# Altium schematic symbol library ECG_PCB.SchLib: 40 symbols
Pins are listed as number, name and electrical type; pins without a type are passive.

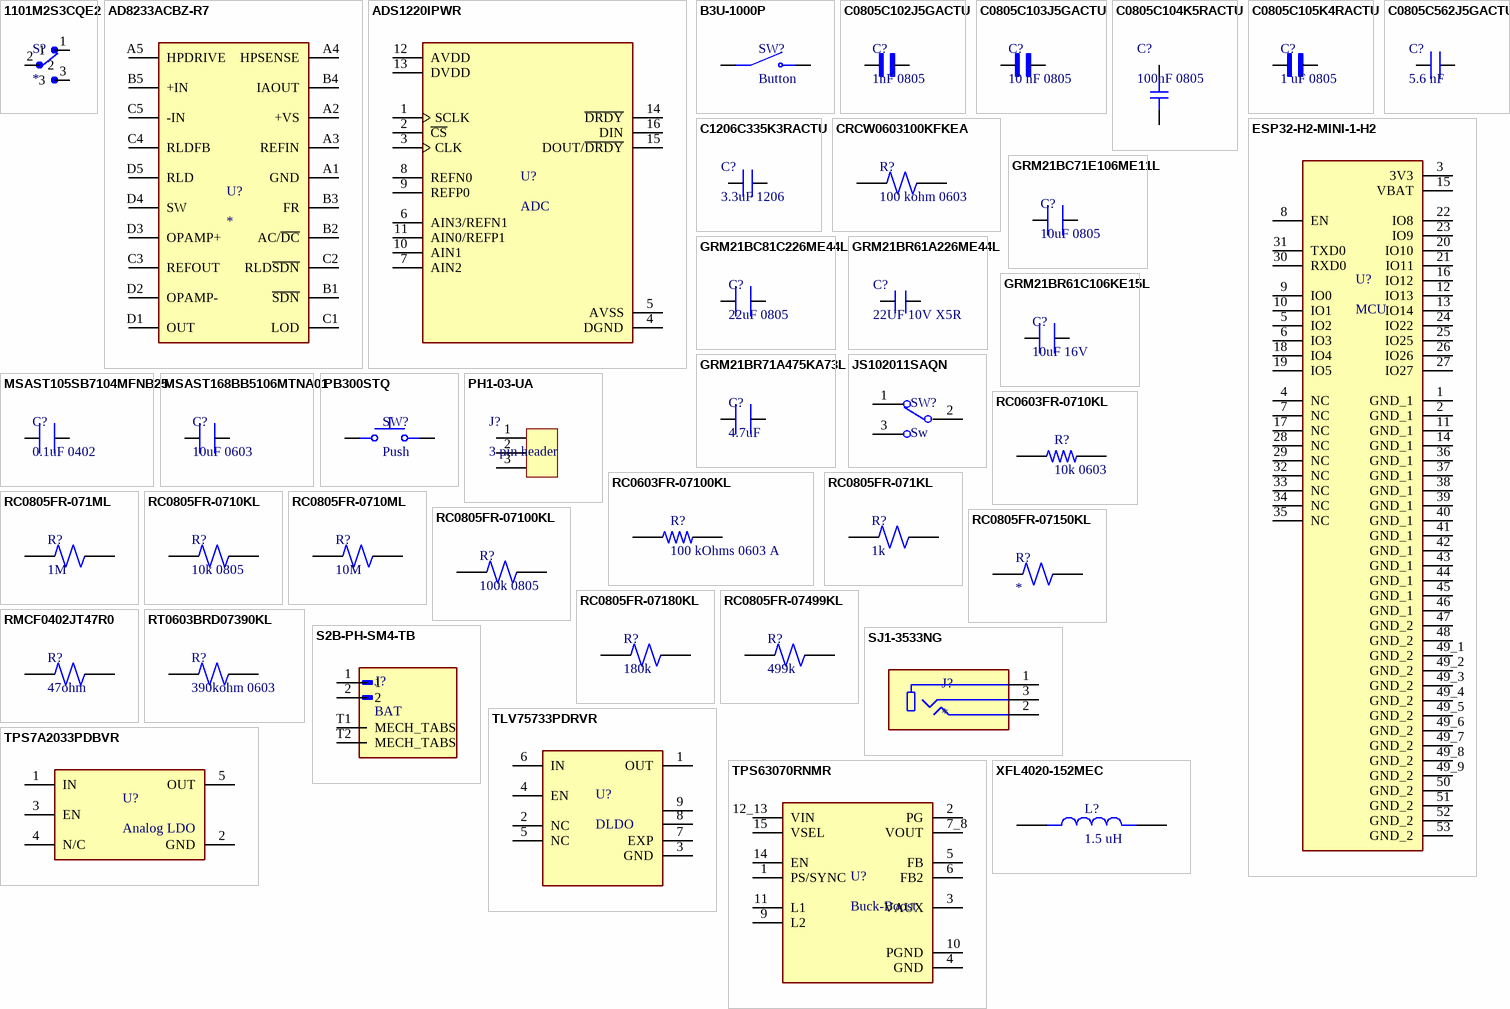
[diagram p0: symbols 1101M2S3CQE2 to XFL4020-152MEC]

## 1101M2S3CQE2
designator S?
Switch,Slide,Sealed,SPDT,ON-NONE-ON,PC Mnt,.200 Blk Act,6A,120VAC,PC Thru-Hole | C&K 1101M2S3CQE2; SnapEDA_Link: https://www.snapeda.com/parts/1101M2S3CQE2/C%2526K/view-part/?ref=snap; Package: None; Value: *; MF: C&K; MP: 1101M2S3CQE2; Check_prices: https://www.snapeda.com/parts/1101M2S3CQE2/C%2526K/view-part/?ref=eda
footprint SW_1101M2S3CQE2
pins: 1, 2, 3

## AD8233ACBZ-R7
designator U?
50 Î¼A, 2 mm Ã— 1.7 mm WLCSP, Low Noise, Heart Rate Monitor for Wearable Products; MF: Analog Devices; MP: AD8233ACBZ-R7; SnapEDA_Link: https://www.snapeda.com/parts/AD8233ACBZ-R7/Analog+Devices/view-part/?ref=snap; Package: WLCSP -20 Analog Devices; Value: *; Check_prices: https://www.snapeda.com/parts/AD8233ACBZ-R7/Analog+Devices/view-part/?ref=eda
footprint BGA20N40P5X4_204X170X56N
pins: A1 GND (power), A2 +VS (power), A3 REFIN, A4 HPSENSE, A5 HPDRIVE, B1 ~{SDN}, B2 AC/~{DC}, B3 FR, B4 IAOUT, B5 +IN, C1 LOD, C2 RLD~{SDN}, C3 REFOUT, C4 RLDFB, C5 -IN, D1 OUT, D2 OPAMP-, D3 OPAMP+, D4 SW, D5 RLD

## ADS1220IPWR
designator U?, comment ADC
24-bit, 2-kSPS, four-channel, low-power, delta-sigma ADC with PGA, VREF, SPI and two IDACs; MF: Texas Instruments; MP: ADS1220IPWR; SnapEDA_Link: https://www.snapeda.com/parts/ADS1220IPWR/Texas+Instruments/view-part/?ref=snap; Package: TSSOP-16 Texas Instruments; Value: *; Check_prices: https://www.snapeda.com/parts/ADS1220IPWR/Texas+Instruments/view-part/?ref=eda
footprint SOP65P640X120-16N
pins: 1 SCLK, 2 ~{CS}, 3 CLK, 4 DGND (power), 5 AVSS (power), 6 AIN3/REFN1, 7 AIN2, 8 REFN0, 9 REFP0, 10 AIN1, 11 AIN0/REFP1, 12 AVDD (power), 13 DVDD (power), 14 ~{DRDY}, 15 DOUT/~{DRDY}, 16 DIN

## B3U-1000P
designator SW?, comment Button
Switch Tactile N.O. SPST Round Button Gull Wing 0.05A 12VDC 1.5N SMD Embossed T/R; MP: B3U-1000P; Price: None; Availability: Unavailable; Value: *; Package: None
footprint SW_B3U-1000P
footprint SW_B3U-1000P
pins: 1, 2

## C0805C102J5GACTU
designator C?, comment 1nF 0805
CAP, 1000PF, 50V, 5%, C0G/NP0, 0805; Capacitance:1000pF; Voltage Rating:50V; Ceramic Capacitor Case:0805 [2012 Metric]; Capacitance Tolerance:Â± 5%; Dielectric Characteristic:C0G / NP0; Product Range:C Series KEMET; Opera; MP: C0805C102J5GAC-TU; SnapEDA_Link: https://www.snapeda.com/parts/C0805C102J5GAC-TU/Kemet/view-part/?ref=snap; Package: Package; Value: *; MF: KEMET; Check_prices: https://www.snapeda.com/parts/C0805C102J5GAC-TU/Kemet/view-part/?ref=eda
footprint CAPC2012X88N
pins: 1, 2

## C0805C103J5GACTU
designator C?, comment 10 nF 0805
0805 C 10nF Ceramic Multilayer Capacitor, 50 V, +125degC, C0G Dielectric, +/-5% | KEMET C0805C103J5GACTU; SnapEDA_Link: https://www.snapeda.com/parts/C0805C103J5GACTU/KEMET/view-part/?ref=snap; Package: 0805 Kemet; Value: *; MF: KEMET; MP: C0805C103J5GACTU; Check_prices: https://www.snapeda.com/parts/C0805C103J5GACTU/KEMET/view-part/?ref=eda
footprint CAPC2012X140N
pins: 1, 2

## C0805C104K5RACTU
designator C?, comment 100nF 0805
Capacitor, Ceramic, Cap, .100uF, Tol 10%, SMT, 50V, X7R, Tape/Reel | KEMET C0805C104K5RACTU; SnapEDA_Link: https://www.snapeda.com/parts/C0805C104K5RACTU/KEMET/view-part/?ref=snap; Package: Package; Value: *; MF: KEMET; MP: C0805C104K5RACTU; Check_prices: https://www.snapeda.com/parts/C0805C104K5RACTU/KEMET/view-part/?ref=eda
footprint CAPC2012X88N
pins: 1 A, 2 B

## C0805C105K4RACTU
designator C?, comment 1 uF 0805
Capacitor,Ceramic,Cap 1 uF,Tol 10%,Vol-Rtg 16 VDC,SMT,0805,X7R,Tape & Reel | KEMET C0805C105K4RACTU; SnapEDA_Link: https://www.snapeda.com/parts/C0805C105K4RACTU/KEMET/view-part/?ref=snap; Package: 805-2 KEMET; Value: *; MF: KEMET; MP: C0805C105K4RACTU; Check_prices: https://www.snapeda.com/parts/C0805C105K4RACTU/KEMET/view-part/?ref=eda
footprint CAPC2012X88N
pins: 1, 2

## C0805C562J5GACTU
designator C?, comment 5.6 nF
SMD Comm C0G, Ceramic, 5600 pF, 5%, 50 VDC, C0G, SMD, MLCC, Ultra-Stable, Low Loss, Class I, 0805; Manufacturer_Name: Kemet; Manufacturer_Part_Number: C0805C562J5GACTU; Copyright: Copyright (C) 2025 Ultra Librarian. All rights reserved.
footprint CAPC220145_88N_KEM
pins: 1, 2

## C1206C335K3RACTU
designator C?, comment 3.3uF 1206
SMD Comm X7R, Ceramic, 3.3 uF, 10%, 25 VDC, X7R, SMD, MLCC, Temperature Stable, Class II, 1206; Manufacturer_Name: Kemet; Manufacturer_Part_Number: C1206C335K3RACTU; Copyright: Copyright (C) 2026 Ultra Librarian. All rights reserved.; Datasheet: https://content.kemet.com/datasheets/KEM_C1002_X7R_SMD.pdf
footprint CAPC340180_180N_KEM
pins: 1, 2

## CRCW0603100KFKEA
designator R?, comment 100 kohm 0603
Resistor, Thick Film, 100 Kilohms, 0.1W, 1%, SMT, TCR 37 ppm/DegC, Tape and Reel | Vishay Dale CRCW0603100KFKEA; SnapEDA_Link: https://www.snapeda.com/parts/CRCW0603100KFKEA/Vishay+Dale/view-part/?ref=snap; Package: 1508 Vishay; Value: *; MF: Vishay; MP: CRCW0603100KFKEA; Check_prices: https://www.snapeda.com/parts/CRCW0603100KFKEA/Vishay+Dale/view-part/?ref=eda
footprint RESC1508X50N
pins: 1, 2

## ESP32-H2-MINI-1-H2
designator U?, comment MCU
802.15.4, Bluetooth Bluetooth v5.3, ZigbeeÂ® Transceiver Module 2.4GHz Integrated, Trace Surface Mount; MF: Espressif Systems; MP: ESP32-H2-MINI-1-H2; SnapEDA_Link: https://www.snapeda.com/parts/ESP32-H2-MINI-1-H2/Espressif+Systems/view-part/?ref=snap; Package: SMD-53 Espressif Systems; Value: *; Check_prices: https://www.snapeda.com/parts/ESP32-H2-MINI-1-H2/Espressif+Systems/view-part/?ref=eda
footprint MODULE_ESP32-H2-MINI-1-H2
pins: 1 GND_1 (power), 2 GND_1 (power), 3 3V3 (power), 4 NC, 5 IO2, 6 IO3, 7 NC, 8 EN, 9 IO0, 10 IO1, 11 GND_1 (power), 12 IO13, 13 IO14, 14 GND_1 (power), 15 VBAT (power), 16 IO12, 17 NC, 18 IO4, 19 IO5, 20 IO10, 21 IO11, 22 IO8, 23 IO9, 24 IO22, 25 IO25, 26 IO26, 27 IO27, 28 NC, 29 NC, 30 RXD0, 31 TXD0, 32 NC, 33 NC, 34 NC, 35 NC, 36 GND_1 (power), 37 GND_1 (power), 38 GND_1 (power), 39 GND_1 (power), 40 GND_1 (power), 41 GND_1 (power), 42 GND_1 (power), 43 GND_1 (power), 44 GND_1 (power), 45 GND_1 (power), 46 GND_1 (power), 47 GND_2 (power), 48 GND_2 (power), 49_1 GND_2 (power), 49_2 GND_2 (power), 49_3 GND_2 (power), 49_4 GND_2 (power), 49_5 GND_2 (power), 49_6 GND_2 (power), 49_7 GND_2 (power), 49_8 GND_2 (power), 49_9 GND_2 (power), 50 GND_2 (power), 51 GND_2 (power), 52 GND_2 (power), 53 GND_2 (power)

## GRM21BC71E106ME11L
designator C?, comment 10uF 0805
0805 10 uF 25 V Â±20% Tolerance X7S Multilayer Ceramic Capacitor; MF: Murata; MP: GRM21BC71E106ME11L; SnapEDA_Link: https://www.snapeda.com/parts/GRM21BC71E106ME11L/Murata/view-part/?ref=snap; Package: 2012 Murata; Value: *; Check_prices: https://www.snapeda.com/parts/GRM21BC71E106ME11L/Murata/view-part/?ref=eda
footprint CAPC2012X145N
pins: 1, 2

## GRM21BC81C226ME44L
designator C?, comment 22uF 0805
0805 22 uF 16 V Â±20% Tolerance X6S Multilayer Ceramic Chip Capacitor; MF: Murata Electronics; MP: GRM21BC81C226ME44L; SnapEDA_Link: https://www.snapeda.com/parts/GRM21BC81C226ME44L/Murata+Electronics+North+America/view-part/?ref=snap; Package: 2012 Murata; Value: *; Check_prices: https://www.snapeda.com/parts/GRM21BC81C226ME44L/Murata+Electronics+North+America/view-part/?ref=eda
footprint CAPC2012X145N
pins: 1, 2

## GRM21BR61A226ME44L
designator C?, comment 22UF 10V X5R
CAP CER 22UF 10V X5R 0805; Manufacturer_Name: Murata; Manufacturer_Part_Number: GRM21BR61A226ME44L; Type: Ceramic Capacitors; Copyright: Copyright (C) 2026 Ultra Librarian. All rights reserved.
footprint CAP_GRM21B_MUR
pins: 1, 2

## GRM21BR61C106KE15L
designator C?, comment 10uF 16V
10 ÂµF Â±10% 16V Ceramic Capacitor X5R 0805 (2012 Metric); MF: Murata; MP: GRM21BR61C106KE15L; SnapEDA_Link: https://www.snapeda.com/parts/GRM21BR61C106KE15L/Murata/view-part/?ref=snap; Package: 805-2 Murata; Value: *; Check_prices: https://www.snapeda.com/parts/GRM21BR61C106KE15L/Murata/view-part/?ref=eda
footprint CAPC2012X135N
pins: 1, 2

## GRM21BR71A475KA73L
designator C?, comment 4.7uF
SMD Capacitor X7R(EIA) with Capacitance: 4.7uF Tol. 10%. Rated Voltage: 10Vdc; MF: Murata; MP: GRM21BR71A475KA73L; SnapEDA_Link: https://www.snapeda.com/parts/GRM21BR71A475KA73L/Murata/view-part/?ref=snap; Package: 2012 Murata; Value: *; Check_prices: https://www.snapeda.com/parts/GRM21BR71A475KA73L/Murata/view-part/?ref=eda
footprint CAPC2012X135N
pins: 1, 2

## JS102011SAQN
designator SW?, comment Sw
Slide Switch SPDT Surface Mount, Right Angle; MP: JS102011SAQN; MF: C&K; Check_prices: https://www.snapeda.com/parts/JS102011SAQN/C%2526K/view-part/?ref=eda; Digi-Key_Part_Number: 401-1999-2-ND; Package: None; Value: *; SnapEDA_Link: https://www.snapeda.com/parts/JS102011SAQN/C%2526K/view-part/?ref=snap; Purchase-URL: https://pricing.snapeda.com/search/part/JS102011SAQN/?ref=eda
footprint SW_JS102011SAQN
pins: 1, 2, 3

## MSAST105SB7104MFNB25
designator C?, comment 0.1uF 0402
CAP CER 0.1UF 25V X7R 0402; MPN: MSAST105SB7104MFNB25; MANUFACTURER: Taiyo Yuden; MAXIMUM_PACKAGE_HEIGHT: 0.55mm; Value: *; STANDARD: IPC-7351B
footprint CAPC1005X55N
pins: 1, 2

## MSAST168BB5106MTNA01
designator C?, comment 10uF 0603
10uF 25V 20% Multilayer Ceramic Capacitor X5R 0603 (1608 Metric); MPN: MSAST168BB5106MTNA01; MANUFACTURER: Taiyo Yuden; MAXIMUM_PACKAGE_HEIGHT: 1.00mm; Package: 1608-2 TAIYO; Value: *; SOURCE_URL: https://www.snapeda.com/parts/MSAST168BB5106MTNA01/Taiyo+Yuden/view-part/; DATASHEET_URL: https://snapeda.s3.amazonaws.com/datasheet/Taiyo_Yuden_MLCC_S.pdf; STANDARD: IPC-7351B
footprint CAPC1608X100N
pins: 1, 2

## PB300STQ
designator SW?, comment Push
Pushbutton Switch, SPST-NO,OFF-(ON),Square Actuator, 28VDC,PC, PB300 Series | E-Switch PB300STQ; SnapEDA_Link: https://www.snapeda.com/parts/PB300STQ/E-Switch/view-part/?ref=snap; Package: None; Value: *; MF: E-Switch; MP: PB300STQ; Check_prices: https://www.snapeda.com/parts/PB300STQ/E-Switch/view-part/?ref=eda
footprint SW_PB300STQ
pins: 2, 3

## PH1-03-UA
designator J?, comment 3 pin header
Description; Manufacturer_Name: ADAM TECHNOLOGIES INC; Manufacturer_Part_Number: PH1-03-UA; Copyright: Copyright (C) 2025 Ultra Librarian. All rights reserved.; RefDes: RefDes; Type: Type
footprint CONN_PH1-03-UA_ADM
pins: 1, 2, 3

## RC0603FR-0710KL
designator R?, comment 10k 0603
10 kOhms Â±1% 0.1W, 1/10W Chip Resistor 0603 (1608 Metric) Moisture Resistant Thick Film; MF: Yageo; MP: RC0603FR-0710KL; SnapEDA_Link: https://www.snapeda.com/parts/RC0603FR-0710KL/Yageo/view-part/?ref=snap; Package: 0603 Yageo; Value: *; Check_prices: https://www.snapeda.com/parts/RC0603FR-0710KL/Yageo/view-part/?ref=eda
footprint RESC1607X60N
pins: 1, 2

## RC0603FR-07100KL
designator R?, comment 100 kOhms 0603 A
100 kOhms Â±1% 0.1W, 1/10W Chip Resistor 0603 (1608 Metric) Moisture Resistant Thick Film; MF: Yageo; MP: RC0603FR-07100KL; SnapEDA_Link: https://www.snapeda.com/parts/RC0603FR-07100KL/Yageo/view-part/?ref=snap; Package: 0603 Yageo; Value: *; Check_prices: https://www.snapeda.com/parts/RC0603FR-07100KL/Yageo/view-part/?ref=eda
footprint RESC1607X60N
pins: 1, 2

## RC0805FR-071KL
designator R?, comment 1k
1 kOhms Â±1% 0.125W, 1/8W Chip Resistor 0805 (2012 Metric) Moisture Resistant Thick Film; MF: Yageo; MP: RC0805FR-071KL; DigiKey_Part_Number: 311-1.00KCRTR-ND; Purchase-URL: https://pricing.snapeda.com/search?q=RC0805FR-071KL&ref=eda; Package: 2012 Yageo; Check_prices: https://www.snapeda.com/parts/RC0805FR-071KL/Yageo/view-part/?ref=eda; Value: *; SnapEDA_Link: https://www.snapeda.com/parts/RC0805FR-071KL/Yageo/view-part/?ref=snap
footprint RESC2012X60N
pins: 1, 2

## RC0805FR-071ML
designator R?, comment 1M
1 MOhms Â±1% 0.125W, 1/8W Chip Resistor 0805 (2012 Metric) Moisture Resistant Thick Film; MF: Yageo; MP: RC0805FR-071ML; SnapEDA_Link: https://www.snapeda.com/parts/RC0805FR-071ML/Yageo/view-part/?ref=snap; Package: 2012 Yageo; Value: *; Check_prices: https://www.snapeda.com/parts/RC0805FR-071ML/Yageo/view-part/?ref=eda
footprint RESC2012X60N
pins: 1, 2

## RC0805FR-0710KL
designator R?, comment 10k 0805
10 kOhms Â±1% 0.125W, 1/8W Chip Resistor 0805 (2012 Metric) Moisture Resistant Thick Film; MF: Yageo; MP: RC0805FR-0710KL; Value: *; SnapEDA_Link: https://www.snapeda.com/parts/RC0805FR-0710KL/Yageo/view-part/?ref=snap; Purchase-URL: https://pricing.snapeda.com/search/part/RC0805FR-0710KL/?ref=eda; Availability: In Stock; Price: None; Package: 2012 Rohm Semiconductor; Check_prices: https://www.snapeda.com/parts/RC0805FR-0710KL/Yageo/view-part/?ref=eda
footprint RESC2012X60N
pins: 1, 2

## RC0805FR-0710ML
designator R?, comment 10M
10 MOhms Â±1% 0.125W, 1/8W Chip Resistor 0805 (2012 Metric) Moisture Resistant Thick Film; MF: Yageo; MP: RC0805FR-0710ML; SnapEDA_Link: https://www.snapeda.com/parts/RC0805FR-0710ML/Yageo/view-part/?ref=snap; Package: 2012 Yageo; Value: *; Check_prices: https://www.snapeda.com/parts/RC0805FR-0710ML/Yageo/view-part/?ref=eda
footprint RESC2012X60N
pins: 1, 2

## RC0805FR-07100KL
designator R?, comment 100k 0805
100 kOhms Â±1% 0.125W, 1/8W Chip Resistor 0805 (2012 Metric) Moisture Resistant Thick Film; MF: Yageo; MP: RC0805FR-07100KL; SnapEDA_Link: https://www.snapeda.com/parts/RC0805FR-07100KL/Yageo/view-part/?ref=snap; Package: 2012 Yageo; Value: *; Check_prices: https://www.snapeda.com/parts/RC0805FR-07100KL/Yageo/view-part/?ref=eda
footprint RESC2012X60N
pins: 1, 2

## RC0805FR-07150KL
designator R?
150 kOhms Â±1% 0.125W, 1/8W Chip Resistor 0805 (2012 Metric) Moisture Resistant Thick Film; MF: Yageo; MP: RC0805FR-07150KL; SnapEDA_Link: https://www.snapeda.com/parts/RC0805FR-07150KL/Yageo/view-part/?ref=snap; Package: 2012 Yageo; Value: *; Check_prices: https://www.snapeda.com/parts/RC0805FR-07150KL/Yageo/view-part/?ref=eda
footprint RESC2012X60N
pins: 1, 2

## RC0805FR-07180KL
designator R?, comment 180k
180 kOhms Â±1% 0.125W, 1/8W Chip Resistor 0805 (2012 Metric) Moisture Resistant Thick Film; MF: Yageo; MP: RC0805FR-07180KL; SnapEDA_Link: https://www.snapeda.com/parts/RC0805FR-07180KL/Yageo/view-part/?ref=snap; Package: 2012 Yageo; Value: *; Check_prices: https://www.snapeda.com/parts/RC0805FR-07180KL/Yageo/view-part/?ref=eda
footprint RESC2012X60N
pins: 1, 2

## RC0805FR-07499KL
designator R?, comment 499k
0805 (2012 mÃ©trico), 499 kOhms Â±1%, 0,125 W, 1/8 W, pelÃ­cula gruesa resistente a la humedad; MF: Yageo; MP: RC0805FR-07499KL; SnapEDA_Link: https://www.snapeda.com/parts/RC0805FR-07499KL/Yageo/view-part/?ref=snap; Package: 2012 Yageo; Value: *; Check_prices: https://www.snapeda.com/parts/RC0805FR-07499KL/Yageo/view-part/?ref=eda
footprint RESC2012X60N
pins: 1, 2

## RMCF0402JT47R0
designator R?, comment 47ohm
47 Ohms Â±5% 0.063W, 1/16W Chip Resistor 0402 (1005 Metric) Automotive AEC-Q200 Thick Film; MF: Stackpole Electronics Inc; MP: RMCF0402JT47R0; SnapEDA_Link: https://www.snapeda.com/parts/RMCF0402JT47R0/Stackpole+Electronics/view-part/?ref=snap; Package: 1005 Stackpole; Value: *; Check_prices: https://www.snapeda.com/parts/RMCF0402JT47R0/Stackpole+Electronics/view-part/?ref=eda
footprint RESC1005X35N
pins: 1, 2

## RT0603BRD07390KL
designator R?, comment 390kohm 0603
390 kOhms Â±0.1% 0.1W, 1/10W Chip Resistor 0603 (1608 Metric) Thin Film; MPN: RT0603BRD07390KL; MANUFACTURER: Yageo; Package: 1608 Yageo; DATASHEET_URL: https://s3.amazonaws.com/snapeda/datasheet/RT0603BRD07390KL_Yageo.pdf; Value: *; SOURCE_URL: https://www.snapeda.com/parts/RT0603BRD07390KL/Yageo/view-part/
footprint RESC1608X55N
pins: 1, 2

## S2B-PH-SM4-TB
designator J?, comment BAT
MPN: S2B-PH-SM4-TB; MANUFACTURER: JST Sales; UNIT: MM; MAXIMUM_PACKAGE_HEIGHT: 5.5mm; STANDARD: Manufacturer Recommendations; Value: *
footprint JST_S2B-PH-SM4-TB
pins: 1, 2, T1 MECH_TABS, T2 MECH_TABS

## SJ1-3533NG
designator J?
3.5 mm Right-Angle Stereo Jack, 3 Pin PCB Mount, Isolated Ground; MF: Same Sky; MP: SJ1-3533NG; SnapEDA_Link: https://www.snapeda.com/parts/SJ1-3533NG/Same+Sky/view-part/?ref=snap; Package: None; Value: *; Check_prices: https://www.snapeda.com/parts/SJ1-3533NG/Same+Sky/view-part/?ref=eda
footprint CUI_SJ1-3533NG
pins: 1, 2, 3

## TLV75733PDRVR
designator U?, comment DLDO
1-A, low-IQ high-accuracy low-dropout (LDO) voltage regulator with enable; MF: Texas Instruments; MP: TLV75733PDRVR; SnapEDA_Link: https://www.snapeda.com/parts/TLV75733PDRVR/Texas+Instruments/view-part/?ref=snap; Package: WSON-6 Texas Instruments; Value: *; Check_prices: https://www.snapeda.com/parts/TLV75733PDRVR/Texas+Instruments/view-part/?ref=eda
footprint VREG_TLV75733PDRVR
pins: 1 OUT, 2 NC, 3 GND (power), 4 EN, 5 NC, 6 IN, 7 EXP (power), 8, 9 OUT

## TPS7A2033PDBVR
designator U?, comment Analog LDO
300-mA ultra-low-noise low-IQ low-dropout (LDO) linear regulator with high PSRR; MF: Texas Instruments; MP: TPS7A2033PDBVR; SnapEDA_Link: https://www.snapeda.com/parts/TPS7A2033PDBVR/Texas+Instruments/view-part/?ref=snap; Package: SOT-23 Texas Instruments; Value: *; Check_prices: https://www.snapeda.com/parts/TPS7A2033PDBVR/Texas+Instruments/view-part/?ref=eda
footprint SOT95P280X145-5N
pins: 1 IN, 2 GND (power), 3 EN, 4 N/C, 5 OUT

## TPS63070RNMR
designator U?, comment Buck-Boost
Wide input voltage (2V-16V) buck-boost converter; MF: Texas Instruments; MP: TPS63070RNMR; SnapEDA_Link: https://www.snapeda.com/parts/TPS63070RNMR/Texas+Instruments/view-part/?ref=snap; Package: VQFN-HR-15 Texas Instruments; Value: *; Check_prices: https://www.snapeda.com/parts/TPS63070RNMR/Texas+Instruments/view-part/?ref=eda
footprint VREG_TPS63070RNMR
pins: 1 PS/SYNC, 2 PG, 3 VAUX, 4 GND (power), 5 FB, 6 FB2, 7_8 VOUT, 9 L2, 10 PGND (power), 11 L1, 12_13 VIN, 14 EN, 15 VSEL

## XFL4020-152MEC
designator L?, comment 1.5 uH
Inductor Power Shielded Wirewound 1.5uH 20% 100KHz 9.1A 15.8mOhm DCR 1515 Automotive Embossed Plastic T/R; MF: Coilcraft; MP: XFL4020-152MEC; SnapEDA_Link: https://www.snapeda.com/parts/XFL4020-152MEC/Coilcraft/view-part/?ref=snap; Package: None; Value: *; Check_prices: https://www.snapeda.com/parts/XFL4020-152MEC/Coilcraft/view-part/?ref=eda
footprint IND_XFL4020-152MEC
pins: 1, 2